# Altium integrated library tactile_6_by_6_mm.IntLib: 1 symbol
Pins are listed as number, name and electrical type; pins without a type are passive.

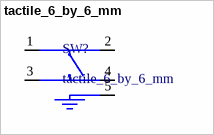
[diagram p0: symbol tactile_6_by_6_mm]

## tactile_6_by_6_mm
designator SW?
footprint tactile_6_by_6_mm
pins: 1, 2, 3, 4, 5